# Altium schematic symbol library 1_µFX7R.SchLib: 1 symbol
Pins are listed as number, name and electrical type; pins without a type are passive.

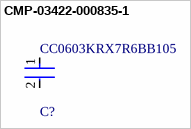
[diagram p0: symbol CMP-03422-000835-1]

## CMP-03422-000835-1
designator C?, comment CC0603KRX7R6BB105
CAP CER 1UF 10V X7R 0603; Manufacturer: YAGEO; Material: Ceramic; Temperature Coefficient: 15%; Tolerance: 0.1; Digikey Description: CAP CER 1UF 10V X7R 0603; Temperature: -55°C to +125°C; ComponentLink2URL: http://www.yageo.com/documents/recent/UPY-GPHC_X7R_6.3V-to-50V_18.pdf; Category: Cap; Voltage Rating: 10 V; Footprint Url: http://www.yageo.com/exep/pages/download/literatures/UPY-C_GEN_24.pdf; Mouser Description: Multilayer Ceramic Capacitors MLCC - SMD/SMT 1.0uF 10V X7R 10%; Device Class L3: Ceramic Capacitors; Temperature Characteristic: X7R; Automotive: No; Package: CC0603-DA; Temperature Range High: +125°C; Voltage: 10 V; Height: 0.9mm; Device Class L1: Passive Components; ComponentLink2Description: Datasheet; Lead Free: Yes; Octopart: https://octopart.com/cc0603krx7r6bb105-yageo-13184191; Capacitance: 1 uF; Manufacturer Part Number: CC0603KRX7R6BB105; Temperature Range Low: -55°C; RoHS: TRUE; Value: 1 uF; Device Class L2: Capacitors
footprint FP-CC0603-DA-IPC_B
footprint FP-CC0603-DA-IPC_A
footprint FP-CC0603-DA-IPC_C
footprint FP-CC0603-DA-MFG
pins: 1, 2